# Altium footprint library WE-RJ45 LAN.PcbLib: 106 footprints (part 6 of 7)
Each footprint in its own frame and in the unit in brackets; x right, y up, seen from the top. Pads: shape width x height; smd on the part's side, far side on the other; paste and mask are expansions set on the pad; w line width, h text height; cw(c..) or ccw(c..) is an arc to the next point about the centre after c.
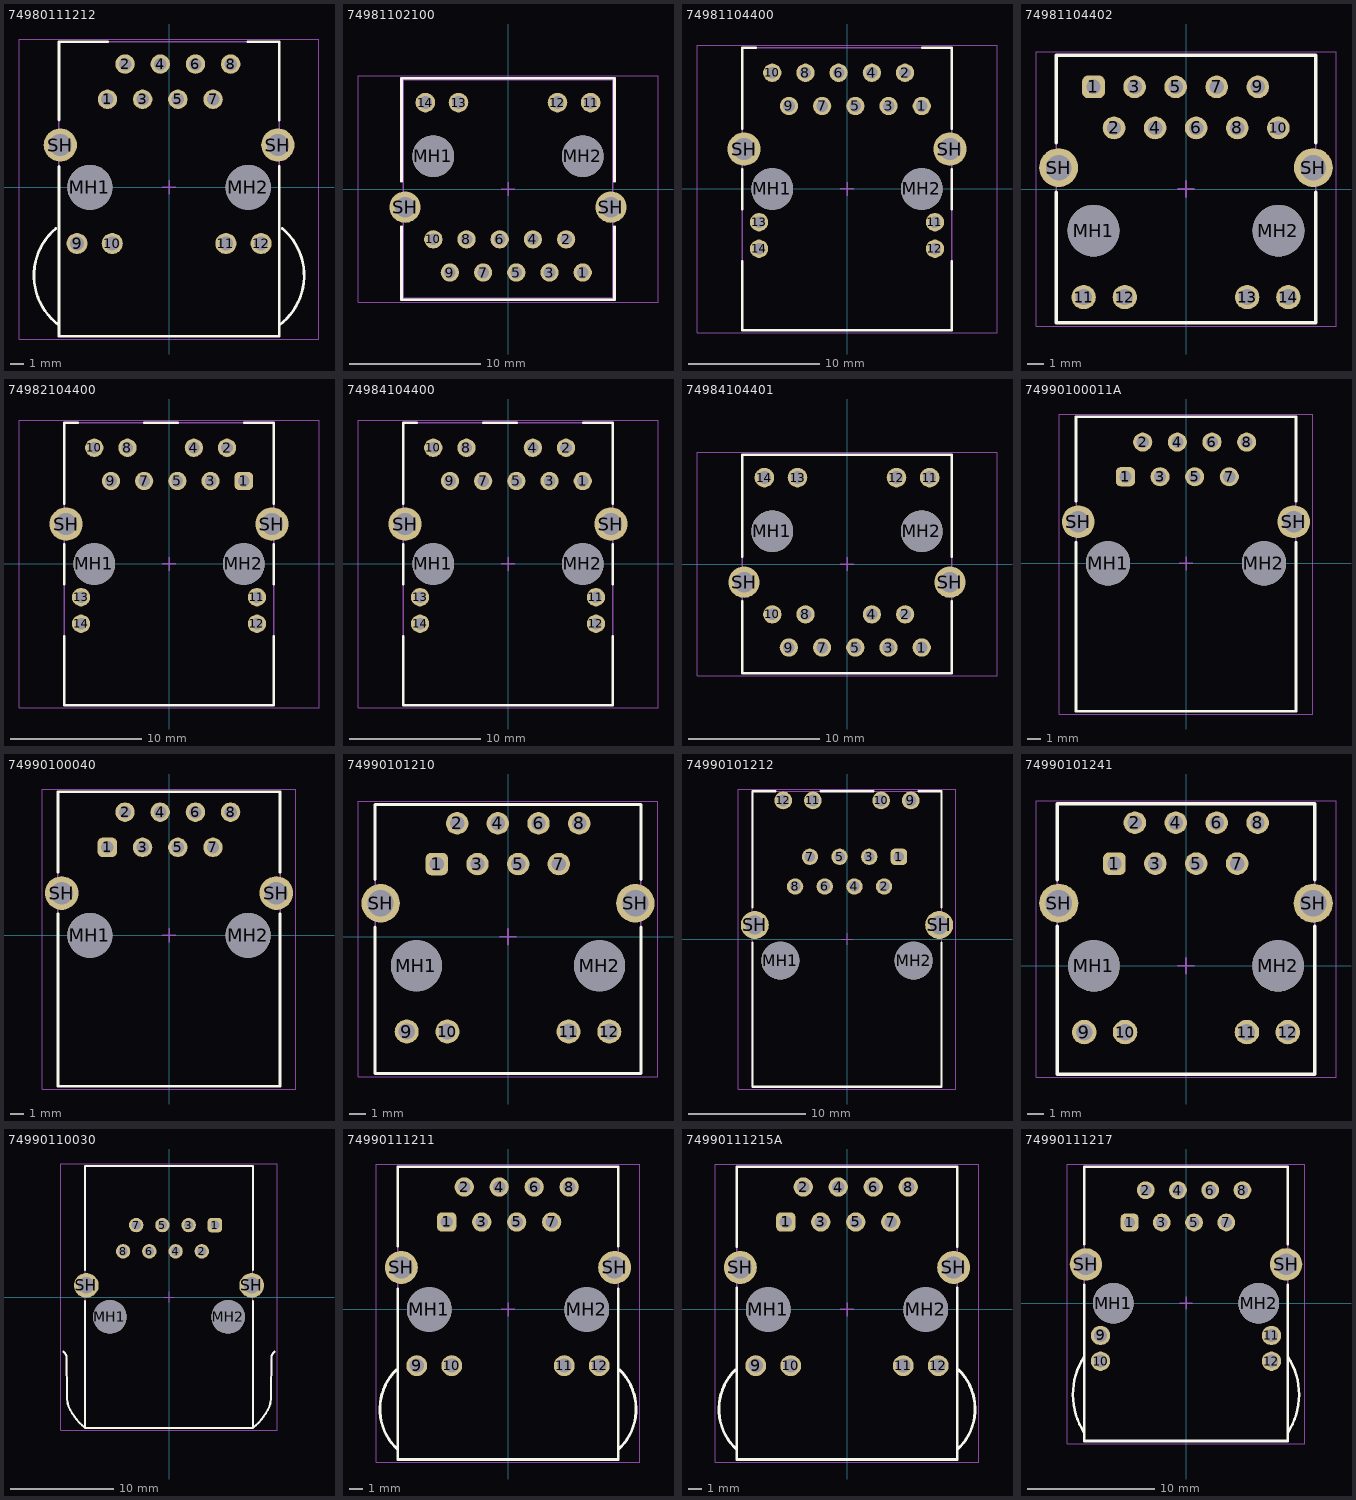
[diagram p5: the footprints below, top view; thin cyan lines are the x and y axes]

## 74980111212 [mm] "Integrated RJ45 Transformer, THR, body 15.9x21.25mm"
height 13.5
pads (16):
  round 1.4 hole 0.9: 1(-4.445,6.35) 2(-3.175,8.89) 3(-1.905,6.35) 4(-0.635,8.89) 5(0.635,6.35) 6(1.905,8.89) 7(3.175,6.35) 8(4.445,8.89)
  round 1.52 hole 1.02: 9(-6.64,-4.06) 10(-4.1,-4.06) 11(4.1,-4.06) 12(6.64,-4.06)
  round 3.25 hole 3.25 unplated: MH1(-5.715,0) MH2(5.715,0)
  round 2.4 hole 1.6: SH(-7.85,3.05) SH(7.85,3.05)
Top Overlay:
  lines w0.2: -8.171,-2.975 ccw(c-5.3,-6.375) -7.95,-9.95 ; -7.95,1.5 -7.95,-10.75 7.95,-10.75 7.95,1.5 ; -7.95,4.85 -7.95,10.5 -4.45,10.5 ; 5.7,10.5 7.95,10.5 7.95,4.85 ; 7.95,-9.95 ccw(c5.3,-6.375) 8.171,-2.975
Top Paste:
  region: 5.095,-2.46 3.095,-2.46 3.095,-5.66 5.095,-5.66
  region: 7.635,-2.46 5.635,-2.46 5.635,-5.66 7.635,-5.66
  rectangle: 3.445,7.89 5.445,10.49
  rectangle: 0.905,7.89 2.905,10.49
  rectangle: -1.635,7.89 0.365,10.49
  rectangle: -4.175,7.89 -2.175,10.49
  rectangle: 2.175,4.95 4.175,7.55
  rectangle: -0.365,4.95 1.635,7.55
  rectangle: -2.905,4.95 -0.905,7.55
  rectangle: -5.445,4.95 -3.445,7.55
  region: -4.895,4.6 -10.595,4.6 -10.595,1.8 -4.895,1.8
  rectangle: 4.895,1.8 10.595,4.6
  rectangle: -5.085,-5.66 -3.085,-2.46
  rectangle: -7.625,-5.66 -5.625,-2.46
Top Assembly:
  lines w0.1: -8.171,-2.975 ccw(c-5.3,-6.375) -7.95,-9.95 ; 7.95,-9.95 ccw(c5.3,-6.375) 8.171,-2.975 ; -7.95,-10.75 7.95,-10.75 7.95,10.5 -7.95,10.5 -7.95,-10.75
Top Designator:
  text ".Designator" at -3.647,-0.357 h1
Top 3D Body:
  lines w0.1: -8.171,-2.975 ccw(c-5.3,-6.375) -7.95,-9.95 ; 7.95,-9.95 ccw(c5.3,-6.375) 8.171,-2.975 ; -7.95,-10.75 7.95,-10.75 7.95,10.5 -7.95,10.5 -7.95,-10.75
Top Courtyard:
  lines w0.05: -10.803,-10.95 -10.803,10.7 10.793,10.7 10.793,-10.95 -10.803,-10.95
Top Component Center:
  lines w0.1: -0.5,0 0.5,0 ; 0,-0.5 0,0.5
3D body "74980111212.stp": height 16.29, standoff -2.33, extent -9.718,-10.75 9.718,10.6

## 74981102100 [mm] "LAN Transformer Through Hole Reflow, body 16.05x16.7mm"
height 16.9
pads (18):
  round 1.4 hole 0.89 paste-2539.97: 1(5.715,-6.39) 2(4.445,-3.85) 3(3.175,-6.39) 4(1.905,-3.85) 5(0.635,-6.39) 6(-0.635,-3.85) 7(-1.905,-6.39) 8(-3.175,-3.85) 9(-4.445,-6.39) 10(-5.715,-3.85)
  round 1.5 hole 1 paste-2539.97: 11(6.325,6.61) 12(3.785,6.61) 13(-3.785,6.61) 14(-6.325,6.61)
  round 3.2 hole 3.2 unplated paste-2539.97: MH1(-5.715,2.5) MH2(5.715,2.5)
  round 2.4 hole 1.57 paste-2539.97: SH(-7.875,-1.39) SH(7.875,-1.39)
Top Overlay:
  lines w0.2: -8.15,-2.9 -8.15,-8.475 8.15,-8.475 8.15,-2.9 ; -8.15,0.6 -8.15,8.475 8.15,8.475 8.15,0.6
Top Paste:
  region: 4.57,-5.45 8.07,-5.45 8.07,-7.05 4.57,-7.05
  region: -5.59,-5.45 -3.3,-5.45 -3.3,-8.05 -5.59,-8.05
  region: -3.05,-5.45 -0.76,-5.45 -0.76,-8.05 -3.05,-8.05
  region: -0.51,-5.45 1.78,-5.45 1.78,-8.05 -0.51,-8.05
  region: 2.03,-5.45 4.32,-5.45 4.32,-8.05 2.03,-8.05
  region: -4.57,-5.15 -6.86,-5.15 -6.86,-2.55 -4.57,-2.55
  region: -2.03,-5.15 -4.32,-5.15 -4.32,-2.55 -2.03,-2.55
  region: 0.51,-5.15 -1.78,-5.15 -1.78,-2.55 0.51,-2.55
  region: 3.05,-5.15 0.76,-5.15 0.76,-2.55 3.05,-2.55
  region: 5.59,-5.15 3.3,-5.15 3.3,-2.55 5.59,-2.55
  region: -4.475,0.35 -11.275,0.35 -11.275,-2.25 -4.475,-2.25
  region: 4.475,0.35 11.275,0.35 11.275,-2.25 4.475,-2.25
  region: -2.425,5.31 -4.625,5.31 -4.625,7.91 -2.425,7.91
  region: 5.145,5.31 2.945,5.31 2.945,7.91 5.145,7.91
  region: 7.685,5.31 5.485,5.31 5.485,7.91 7.685,7.91
  region: -4.965,5.31 -7.165,5.31 -7.165,7.91 -4.965,7.91
Top Assembly:
  lines w0.1: -8.025,-8.35 8.025,-8.35 8.025,8.35 -8.025,8.35 -8.025,-8.35
Top Designator:
  text ".Designator" at -3.647,-0.357 h1
Top 3D Body:
  lines w0.1: -8.025,-8.35 8.025,-8.35 8.025,8.35 -8.025,8.35 -8.025,-8.35
Top Courtyard:
  lines w0.05: -11.475,-8.675 11.475,-8.675 11.475,8.675 -11.475,8.675 -11.475,-8.675
Top Component Center:
  lines w0.1: -0.5,0 0.5,0 ; 0,-0.5 0,0.5
3D body "74981102100.stp": height 16.95, standoff -2.15, extent -8.225,-8.6 8.225,8.35

## 74981104400 [mm] "10/100/1000 Base-T, THT, 1x1, Tab up, w/o shield tabs, LED L-R yellow-green/yellow-green, THR"
height 13.85
pads (18):
  round 1.4 hole 0.89: 1(5.72,6.35) 2(4.44,8.89) 3(3.18,6.35) 4(1.9,8.89) 5(0.64,6.35) 6(-0.64,8.89) 7(-1.9,6.35) 8(-3.18,8.89) 9(-4.44,6.35) 10(-5.72,8.89) 11(6.725,-2.54) 12(6.725,-4.57) 13(-6.725,-2.54) 14(-6.725,-4.57)
  round 3.2 hole 3.2 unplated: MH1(-5.715,0) MH2(5.715,0)
  round 2.55 hole 1.7: SH(-7.875,3.05) SH(7.875,3.05)
Top Overlay:
  lines w0.2: -8,-5.55 -8,-10.8 8,-10.8 8,-5.55 ; -8,-1.55 -8,1.5 ; -8,4.6 -8,10.8 -7,10.8 ; 5.75,10.8 8,10.8 8,4.6 ; 8,-1.55 8,1.5
Top Paste:
  region: -4.825,-3.34 -8.625,-3.34 -8.625,-1.74 -4.825,-1.74
  region: -4.825,-5.37 -8.625,-5.37 -8.625,-3.77 -4.825,-3.77
  region: 8.625,-3.34 4.825,-3.34 4.825,-1.74 8.625,-1.74
  region: 8.625,-5.37 4.825,-5.37 4.825,-3.77 8.625,-3.77
  region: -3.33,7.45 -5.53,7.45 -5.53,4.65 -3.33,4.65
  region: -0.79,7.45 -2.99,7.45 -2.99,4.65 -0.79,4.65
  region: 1.75,7.45 -0.45,7.45 -0.45,4.65 1.75,4.65
  region: 4.29,7.45 2.09,7.45 2.09,4.65 4.29,4.65
  region: 6.83,7.45 4.63,7.45 4.63,4.65 6.83,4.65
  region: 5.55,7.79 3.35,7.79 3.35,10.59 5.55,10.59
  region: 3.01,7.79 0.81,7.79 0.81,10.59 3.01,10.59
  region: -4.61,7.79 -6.81,7.79 -6.81,10.59 -4.61,10.59
  region: -2.07,7.79 -4.27,7.79 -4.27,10.59 -2.07,10.59
  region: 0.47,7.79 -1.73,7.79 -1.73,10.59 0.47,10.59
  region: -4.475,1.75 -11.275,1.75 -11.275,4.35 -4.475,4.35
  region: 11.275,1.75 4.475,1.75 4.475,4.35 11.275,4.35
Assembly Notes:
  text "The stencil layout appplied for / PCB 1.6mm and Stencil 0.15mm" at -5.4,-12.65 h0.5
Top Assembly:
  lines w0.1: -8,-10.8 -8,10.8 8,10.8 8,-10.8 -8,-10.8
Top Designator:
  text ".Designator" at -3.647,-0.357 h1
Top 3D Body:
  lines w0.1: -8,-10.8 -8,10.8 8,10.8 8,-10.8 -8,-10.8
Top Courtyard:
  lines w0.05: -11.475,-11 11.475,-11 11.475,11 -11.475,11 -11.475,-11
Top Component Center:
  lines w0.1: -0.5,0 0.5,0 ; 0,-0.5 0,0.5
3D body "74981104400.stp": height 13.62, standoff -2.9, extent -8.15,-10.8 8.15,10.8

## 74981104402 [mm] "Integrated RJ45 Transformer"
height 16.9
pads (18):
  rrect50% 1.4x1.4 hole 0.89: 1(-5.72,6.315)
  round 1.4 hole 0.89: 2(-4.45,3.775) 3(-3.18,6.315) 4(-1.91,3.775) 5(-0.64,6.315) 6(0.63,3.775) 7(1.9,6.315) 8(3.17,3.775) 9(4.44,6.315) 10(5.71,3.775)
  round 1.5 hole 1: 11(-6.325,-6.685) 12(-3.785,-6.685) 13(3.785,-6.685) 14(6.325,-6.685)
  round 3.2 hole 3.2 unplated: MH1(-5.715,-2.575) MH2(5.715,-2.575)
  round 2.4 hole 1.57: SH(-7.875,1.325) SH(7.875,1.325)
Top Overlay:
  lines w0.2: -8.025,-0.2 -8.025,-8.275 8.025,-8.275 8.025,-0.2 ; -8.025,2.85 -8.025,8.275 8.025,8.275 8.025,2.85
Top Assembly:
  lines w0.1: -8.025,-8.275 8.025,-8.275 8.025,8.275 -8.025,8.275 -8.025,-8.275
Top Designator:
  text ".Designator" at -3.647,-0.357 h1
Top 3D Body:
  lines w0.1: -8.025,-8.275 8.025,-8.275 8.025,8.275 -8.025,8.275 -8.025,-8.275
Top Courtyard:
  lines w0.05: -9.275,-8.475 9.275,-8.475 9.275,8.475 -9.275,8.475 -9.275,-8.475
Top Component Center:
  lines w0.1: -0.5,0 0.5,0 ; 0,-0.5 0,0.5
3D body "74981104402.stp": height 16.95, standoff -2.15, extent -8.225,-8.425 8.225,8.275

## 74982104400 [mm] "10/100Base-T, PoE, THT, 1x1, Tab up, w/o shield tabs, LED L-R yellow-green/yellow-green, THR"
height 13.85
pads (17):
  rrect50% 1.4x1.4 hole 0.89: 1(5.72,6.35)
  round 1.4 hole 0.89: 2(4.44,8.89) 3(3.18,6.35) 4(1.9,8.89) 5(0.64,6.35) 7(-1.9,6.35) 8(-3.18,8.89) 9(-4.44,6.35) 10(-5.72,8.89) 11(6.725,-2.54) 12(6.725,-4.57) 13(-6.725,-2.54) 14(-6.725,-4.57)
  round 3.2 hole 3.2 unplated: MH1(-5.715,0) MH2(5.715,0)
  round 2.55 hole 1.7: SH(-7.875,3.05) SH(7.875,3.05)
Top Overlay:
  lines w0.2: -8,-5.55 -8,-10.8 8,-10.8 8,-5.55 ; -8,-1.56 -8,1.5 ; -8,4.6 -8,10.8 -7,10.8 ; -1.9,10.8 0.65,10.8 ; 5.75,10.8 8,10.8 8,4.6 ; 8,-1.56 8,1.5
Top Paste:
  region: 11.275,1.75 4.475,1.75 4.475,4.35 11.275,4.35
  region: -4.475,1.75 -11.275,1.75 -11.275,4.35 -4.475,4.35
  region: -2.07,7.79 -4.27,7.79 -4.27,10.59 -2.07,10.59
  region: -4.61,7.79 -6.81,7.79 -6.81,10.59 -4.61,10.59
  region: 3.01,7.79 0.81,7.79 0.81,10.59 3.01,10.59
  region: 5.55,7.79 3.35,7.79 3.35,10.59 5.55,10.59
  region: 6.83,7.45 4.63,7.45 4.63,4.65 6.83,4.65
  region: 4.29,7.45 2.09,7.45 2.09,4.65 4.29,4.65
  region: 1.75,7.45 -0.45,7.45 -0.45,4.65 1.75,4.65
  region: -0.79,7.45 -2.99,7.45 -2.99,4.65 -0.79,4.65
  region: -3.33,7.45 -5.53,7.45 -5.53,4.65 -3.33,4.65
  region: 8.625,-5.37 4.825,-5.37 4.825,-3.77 8.625,-3.77
  region: 8.625,-3.34 4.825,-3.34 4.825,-1.74 8.625,-1.74
  region: -4.825,-5.37 -8.625,-5.37 -8.625,-3.77 -4.825,-3.77
  region: -4.825,-3.34 -8.625,-3.34 -8.625,-1.74 -4.825,-1.74
Assembly Notes:
  text "The stencil layout appplied for / PCB 1.6mm and Stencil 0.15mm" at -5.125,-12.75 h0.5
Top Assembly:
  lines w0.1: -8,-10.8 8,-10.8 8,10.8 -8,10.8 -8,-10.8
Top Designator:
  text ".Designator" at -3.647,-0.357 h1
Top 3D Body:
  lines w0.1: -8,-10.8 8,-10.8 8,10.8 -8,10.8 -8,-10.8
Top Courtyard:
  lines w0.05: -11.475,-11 -11.475,11 11.475,11 11.475,-11 -11.475,-11
Top Component Center:
  lines w0.1: -0.5,0 0.5,0 ; 0,-0.5 0,0.5
3D body "74982104400.stp": height 13.62, standoff -2.9, extent -8.15,-10.8 8.15,10.8

## 74984104400 [mm] "10/100Base-T, PoE+, THT, 1x1, Tab up, w/o shield tabs, LED L-R yellow-green/yellow-green, THRw-green/yellow-green, THR"
height 13.85
pads (17):
  round 1.4 hole 0.89: 1(5.72,6.35) 2(4.44,8.89) 3(3.18,6.35) 4(1.9,8.89) 5(0.64,6.35) 7(-1.9,6.35) 8(-3.18,8.89) 9(-4.44,6.35) 10(-5.72,8.89) 11(6.725,-2.54) 12(6.725,-4.57) 13(-6.725,-2.54) 14(-6.725,-4.57)
  round 3.2 hole 3.2 unplated: MH1(-5.715,0) MH2(5.715,0)
  round 2.55 hole 1.7: SH(-7.875,3.05) SH(7.875,3.05)
Top Overlay:
  lines w0.2: -8,-5.55 -8,-10.8 8,-10.8 8,-5.55 ; -8,-1.56 -8,1.5 ; -8,4.6 -8,10.8 -7,10.8 ; -1.9,10.8 0.65,10.8 ; 5.75,10.8 8,10.8 8,4.6 ; 8,-1.56 8,1.5
Top Paste:
  region: 11.275,1.75 4.475,1.75 4.475,4.35 11.275,4.35
  region: -4.475,1.75 -11.275,1.75 -11.275,4.35 -4.475,4.35
  region: -2.07,7.79 -4.27,7.79 -4.27,10.59 -2.07,10.59
  region: -4.61,7.79 -6.81,7.79 -6.81,10.59 -4.61,10.59
  region: 3.01,7.79 0.81,7.79 0.81,10.59 3.01,10.59
  region: 5.55,7.79 3.35,7.79 3.35,10.59 5.55,10.59
  region: 6.83,7.45 4.63,7.45 4.63,4.65 6.83,4.65
  region: 4.29,7.45 2.09,7.45 2.09,4.65 4.29,4.65
  region: 1.75,7.45 -0.45,7.45 -0.45,4.65 1.75,4.65
  region: -0.79,7.45 -2.99,7.45 -2.99,4.65 -0.79,4.65
  region: -3.33,7.45 -5.53,7.45 -5.53,4.65 -3.33,4.65
  region: 8.625,-5.37 4.825,-5.37 4.825,-3.77 8.625,-3.77
  region: 8.625,-3.34 4.825,-3.34 4.825,-1.74 8.625,-1.74
  region: -4.825,-5.37 -8.625,-5.37 -8.625,-3.77 -4.825,-3.77
  region: -4.825,-3.34 -8.625,-3.34 -8.625,-1.74 -4.825,-1.74
Assembly Notes:
  text "The stencil layout appplied for / PCB 1.6mm and Stencil 0.15mm" at -5.15,-12.7 h0.5
Top Assembly:
  lines w0.1: -8,-10.8 8,-10.8 8,10.8 -8,10.8 -8,-10.8
Top Designator:
  text ".Designator" at -3.647,-0.357 h1
Top 3D Body:
  lines w0.1: -8,-10.8 8,-10.8 8,10.8 -8,10.8 -8,-10.8
Top Courtyard:
  lines w0.05: -11.475,-11 -11.475,11 11.475,11 11.475,-11 -11.475,-11
Top Component Center:
  lines w0.1: -0.5,0 0.5,0 ; 0,-0.5 0,0.5
3D body "74984104400.stp": height 13.62, standoff -2.9, extent -8.15,-10.8 8.15,10.8

## 74984104401 [mm] "LAN Transformer Through Hole Reflow, body 16.05x16.7mm"
height 16.9
pads (17):
  round 1.4 hole 0.89 paste-2539.97: 1(5.715,-6.39) 2(4.445,-3.85) 3(3.175,-6.39) 4(1.905,-3.85) 5(0.635,-6.39) 7(-1.905,-6.39) 8(-3.175,-3.85) 9(-4.445,-6.39) 10(-5.715,-3.85)
  round 1.5 hole 1 paste-2539.97: 11(6.325,6.61) 12(3.785,6.61) 13(-3.785,6.61) 14(-6.325,6.61)
  round 3.2 hole 3.2 unplated paste-2539.97: MH1(-5.715,2.5) MH2(5.715,2.5)
  round 2.4 hole 1.57 paste-2539.97: SH(-7.875,-1.39) SH(7.875,-1.39)
Top Overlay:
  lines w0.2: -8.025,-2.85 -8.025,-8.35 8.025,-8.35 8.025,-2.85 ; -8.025,0.55 -8.025,8.35 8.025,8.35 8.025,0.55
Top Paste:
  region: 4.57,-5.45 8.07,-5.45 8.07,-7.05 4.57,-7.05
  region: -5.59,-5.45 -3.3,-5.45 -3.3,-8.05 -5.59,-8.05
  region: -3.05,-5.45 -0.76,-5.45 -0.76,-8.05 -3.05,-8.05
  region: -0.51,-5.45 1.78,-5.45 1.78,-8.05 -0.51,-8.05
  region: 2.03,-5.45 4.32,-5.45 4.32,-8.05 2.03,-8.05
  region: -4.57,-5.15 -6.86,-5.15 -6.86,-2.55 -4.57,-2.55
  region: -2.03,-5.15 -4.32,-5.15 -4.32,-2.55 -2.03,-2.55
  region: 3.05,-5.15 0.76,-5.15 0.76,-2.55 3.05,-2.55
  region: 5.59,-5.15 3.3,-5.15 3.3,-2.55 5.59,-2.55
  region: -4.475,0.35 -11.275,0.35 -11.275,-2.25 -4.475,-2.25
  region: 4.475,0.35 11.275,0.35 11.275,-2.25 4.475,-2.25
  region: -2.425,5.31 -4.625,5.31 -4.625,7.91 -2.425,7.91
  region: 5.145,5.31 2.945,5.31 2.945,7.91 5.145,7.91
  region: 7.685,5.31 5.485,5.31 5.485,7.91 7.685,7.91
  region: -4.965,5.31 -7.165,5.31 -7.165,7.91 -4.965,7.91
Top Assembly:
  lines w0.1: -8.025,-8.35 8.025,-8.35 8.025,8.35 -8.025,8.35 -8.025,-8.35
Top Designator:
  text ".Designator" at -3.647,-0.357 h1
Top 3D Body:
  lines w0.1: -8.025,-8.35 8.025,-8.35 8.025,8.35 -8.025,8.35 -8.025,-8.35
Top Courtyard:
  lines w0.05: -11.475,-8.55 11.475,-8.55 11.475,8.55 -11.475,8.55 -11.475,-8.55
Top Component Center:
  lines w0.1: -0.5,0 0.5,0 ; 0,-0.5 0,0.5
3D body "74984104401.stp": height 16.95, standoff -2.15, extent -8.225,-8.35 8.223,8.35

## 74990100011A [mm] "LAN Transformer, body 21.84x16.13mm"
height 13.74
pads (12):
  rrect50% 1.4x1.4 hole 0.89: 1(-4.445,6.35)
  round 1.4 hole 0.89: 2(-3.175,8.89) 3(-1.905,6.35) 4(-0.635,8.89) 5(0.635,6.35) 6(1.905,8.89) 7(3.175,6.35) 8(4.445,8.89)
  round 3.25 hole 3.25 unplated: MH1(-5.715,0) MH2(5.715,0)
  round 2.4 hole 1.6: SH(-7.9,3.05) SH(7.9,3.05)
Top Overlay:
  lines w0.2: -8.065,1.55 -8.065,-10.85 8.065,-10.85 8.065,1.55 ; -8.065,4.55 -8.065,10.75 8.065,10.75 8.065,4.55
Top Assembly:
  lines w0.1: -8.065,-10.85 -8.065,10.75 8.065,10.75 8.065,-10.85 -8.065,-10.85
Top Designator:
  text ".Designator" at -3.647,-0.357 h1
Top 3D Body:
  lines w0.1: -8.065,-10.85 -8.065,10.75 8.065,10.75 8.065,-10.85 -8.065,-10.85
Top Courtyard:
  lines w0.05: -9.3,-11.05 9.3,-11.05 9.3,10.95 -9.3,10.95 -9.3,-11.05
Top Component Center:
  lines w0.1: -0.5,0 0.5,0 ; 0,-0.5 0,0.5
3D body "74990100011A.stp": height 13.78, standoff -2.94, extent -8.089,-10.85 8.089,10.75

## 74990100040 [mm] "10/100Base-T, THT, 1x1, Tab down, w/o shield tabs, w/o LED, ETR"
height 13.5
pads (12):
  rrect50% 1.4x1.4 hole 0.89: 1(-4.445,6.35)
  round 1.4 hole 0.89: 2(-3.175,8.89) 3(-1.905,6.35) 4(-0.635,8.89) 5(0.635,6.35) 6(1.905,8.89) 7(3.175,6.35) 8(4.445,8.89)
  round 3.25 hole 3.25 unplated: MH1(-5.715,0) MH2(5.715,0)
  round 2.43 hole 1.63: SH(-7.745,3.05) SH(7.745,3.05)
Top Overlay:
  lines w0.2: -8.02,1.55 -8.02,-10.89 8.02,-10.89 8.02,1.55 ; -8.02,4.55 -8.02,10.36 8.02,10.36 8.02,4.55
Top Assembly:
  lines w0.1: -8.02,-10.89 8.02,-10.89 8.02,10.36 -8.02,10.36 -8.02,-10.89
Top Designator:
  text ".Designator" at -3.647,-0.357 h1
Top 3D Body:
  lines w0.1: -8.02,-10.89 8.02,-10.89 8.02,10.36 -8.02,10.36 -8.02,-10.89
Top Courtyard:
  lines w0.05: -9.145,-11.09 9.145,-11.09 9.145,10.56 -9.145,10.56 -9.145,-11.09
Top Component Center:
  lines w0.1: -0.5,0 0.5,0 ; 0,-0.5 0,0.5
3D body "74990100040.stp": height 13.55, standoff -3.55, extent -8.15,-10.89 8.15,10.36

## 74990101210 [mm] "LAN Transformer, THT, body 17.1x16.6mm"
height 17.5
pads (16):
  rrect50% 1.4x1.4 hole 0.89: 1(-4.445,4.53)
  round 1.4 hole 0.89: 2(-3.175,7.07) 3(-1.905,4.53) 4(-0.635,7.07) 5(0.635,4.53) 6(1.905,7.07) 7(3.175,4.53) 8(4.445,7.07)
  round 1.5 hole 1.02: 9(-6.325,-5.93) 10(-3.785,-5.93) 11(3.785,-5.93) 12(6.325,-5.93)
  round 3.2 hole 3.2 unplated: MH1(-5.715,-1.82) MH2(5.715,-1.82)
  round 2.4 hole 1.63: SH(-7.95,2.08) SH(7.95,2.08)
Top Overlay:
  lines w0.2: -8.3,0.6 -8.3,-8.55 8.3,-8.55 8.3,0.6 ; -8.3,3.56 -8.3,8.25 8.3,8.25 8.3,3.56
Top Assembly:
  lines w0.1: -8.3,-8.55 -8.3,8.25 8.3,8.25 8.3,-8.55 -8.3,-8.55
Top Designator:
  text ".Designator" at -3.647,-0.357 h1
Top 3D Body:
  lines w0.1: -8.3,-8.55 -8.3,8.25 8.3,8.25 8.3,-8.55 -8.3,-8.55
Top Courtyard:
  lines w0.05: -9.365,-8.75 -9.365,8.45 9.365,8.45 9.365,-8.75 -9.365,-8.75
Top Component Center:
  lines w0.1: -0.5,0 0.5,0 ; 0,-0.5 0,0.5
3D body "74990101210.stp": height 17.1, standoff -3.5, extent -8.3,-8.55 8.3,8.35

## 74990101212 [mm] "LAN Transformer, body 25.3x16.2mm"
height 13.5
pads (16):
  rrect50% 1.4x1.4 hole 0.9: 1(4.445,7.04)
  round 1.4 hole 0.9: 2(3.175,4.5) 3(1.905,7.04) 4(0.635,4.5) 5(-0.635,7.04) 6(-1.905,4.5) 7(-3.175,7.04) 8(-4.445,4.5)
  round 1.52 hole 1.02: 9(5.465,11.87) 10(2.925,11.87) 11(-2.925,11.87) 12(-5.465,11.87)
  round 3.25 hole 3.25 unplated: MH1(-5.715,-1.85) MH2(5.715,-1.85)
  round 2.4 hole 1.6: SH(-7.9,1.2) SH(7.9,1.2)
Top Overlay:
  lines w0.2: -8.1,-0.3 -8.1,-12.65 8.1,-12.65 8.1,-0.3 ; -8.1,2.7 -8.1,12.65 -6.15,12.65 ; -2.25,12.65 2.24,12.65 ; 6.15,12.65 8.1,12.65 8.1,2.7
Top Assembly:
  lines w0.1: -8.1,-12.65 8.1,-12.65 8.1,12.65 -8.1,12.65 -8.1,-12.65
Top Designator:
  text ".Designator" at -3.647,-0.357 h1
Top 3D Body:
  lines w0.1: -8.1,-12.65 8.1,-12.65 8.1,12.65 -8.1,12.65 -8.1,-12.65
Top Courtyard:
  lines w0.05: -9.3,-12.85 9.3,-12.85 9.3,12.85 -9.3,12.85 -9.3,-12.85
Top Component Center:
  lines w0.1: -0.5,0 0.5,0 ; 0,-0.5 0,0.5
3D body "74990101212.stp": height 13.61, standoff -3.79, extent -8.2,-12.65 8.2,12.65

## 74990101241 [mm] "LAN Transformer, body 17.5x16.8mm"
height 17.5
pads (16):
  rrect50% 1.4x1.4 hole 0.89: 1(-4.445,6.35)
  round 1.4 hole 0.89: 2(-3.175,8.89) 3(-1.905,6.35) 4(-0.635,8.89) 5(0.635,6.35) 6(1.905,8.89) 7(3.175,6.35) 8(4.445,8.89)
  round 1.52 hole 1.02: 9(-6.325,-4.11) 10(-3.785,-4.11) 11(3.785,-4.11) 12(6.325,-4.11)
  round 3.2 hole 3.2 unplated: MH1(-5.715,0) MH2(5.715,0)
  round 2.43 hole 1.63: SH(-7.9,3.89) SH(7.9,3.89)
Top Overlay:
  lines w0.2: -8,2.47 -8,-6.73 8,-6.73 8,2.47 ; -8,5.33 -8,10.07 8,10.07 8,5.33
Top Assembly:
  lines w0.1: -8,-6.73 8,-6.73 8,10.07 -8,10.07 -8,-6.73
Top Designator:
  text ".Designator" at -3.647,-0.357 h1
Top 3D Body:
  lines w0.1: -8,-6.73 8,-6.73 8,10.07 -8,10.07 -8,-6.73
Top Courtyard:
  lines w0.05: -9.315,-6.93 -9.315,10.27 9.315,10.27 9.315,-6.93 -9.315,-6.93
Top Component Center:
  lines w0.1: -0.5,0 0.5,0 ; 0,-0.5 0,0.5
3D body "74990101241.stp": height 16.94, standoff -3.46, extent -8.17,-6.78 8.17,10.07

## 74990110030 [mm] "LAN Transformer, body 25.35x16.25mm"
height 13.5
pads (12):
  rrect50% 1.4x1.4 hole 0.9: 1(4.445,6.965)
  round 1.4 hole 0.9: 2(3.175,4.425) 3(1.905,6.965) 4(0.635,4.425) 5(-0.635,6.965) 6(-1.905,4.425) 7(-3.175,6.965) 8(-4.445,4.425)
  round 3.25 hole 3.25 unplated: MH1(-5.715,-1.925) MH2(5.715,-1.925)
  round 2.4 hole 1.6: SH(-8,1.125) SH(8,1.125)
Top Overlay:
  lines w0.2: -10.21,-5.293 cw(c-10.631,-5.879) -9.917,-5.98 -9.879,-9.38 ccw(c-3,-9.28) -9.853,-9.88 ccw(c-7.8,-9.88) -9.728,-10.585 ccw(c-4.3,-8.08) -8.125,-12.675 ; -8.125,-0.375 -8.125,-12.675 ; -8.125,2.625 -8.125,12.675 8.125,12.675 8.125,2.625 ; 8.125,-0.375 8.125,-12.675 ; 10.21,-5.293 ccw(c10.631,-5.879) 9.917,-5.98 9.879,-9.38 cw(c3,-9.28) 9.853,-9.88 cw(c7.8,-9.88) 9.728,-10.585 cw(c4.3,-8.08) 8.125,-12.675 ; -8.125,-12.675 8.125,-12.675
Top Assembly:
  lines w0.1: -10.21,-5.293 cw(c-10.631,-5.879) -9.917,-5.98 -9.879,-9.38 ccw(c-3,-9.28) -9.853,-9.88 ccw(c-7.8,-9.88) -9.728,-10.585 ccw(c-4.3,-8.08) -8.125,-12.675 ; 10.21,-5.293 ccw(c10.631,-5.879) 9.917,-5.98 9.879,-9.38 cw(c3,-9.28) 9.853,-9.88 cw(c7.8,-9.88) 9.728,-10.585 cw(c4.3,-8.08) 8.125,-12.675 ; -8.125,-12.675 -8.125,12.675 8.125,12.675 8.125,-12.675 ; -8.125,-12.675 8.125,-12.675
Top Designator:
  text ".Designator" at -3.647,-0.357 h1
Top 3D Body:
  lines w0.1: -10.21,-5.293 cw(c-10.631,-5.879) -9.917,-5.98 -9.879,-9.38 ccw(c-3,-9.28) -9.853,-9.88 ccw(c-7.8,-9.88) -9.728,-10.585 ccw(c-4.3,-8.08) -8.125,-12.675 ; 10.21,-5.293 ccw(c10.631,-5.879) 9.917,-5.98 9.879,-9.38 cw(c3,-9.28) 9.853,-9.88 cw(c7.8,-9.88) 9.728,-10.585 cw(c4.3,-8.08) 8.125,-12.675 ; -8.125,-12.675 -8.125,12.675 8.125,12.675 8.125,-12.675 ; -8.125,-12.675 8.125,-12.675
Top Courtyard:
  lines w0.05: -10.5,-12.875 10.5,-12.875 10.5,12.875 -10.5,12.875 -10.5,-12.875
Top Component Center:
  lines w0.1: -0.5,0 0.5,0 ; 0,-0.5 0,0.5
3D body "74990110030.stp": height 15.78, standoff -3.33, extent -10.298,-12.675 10.298,12.675

## 74990111211 [mm] "Integrated RJ45 Transformer, THT, body 16.00 x 21.25 mm"
height 13.5
pads (16):
  rrect50% 1.4x1.4 hole 0.9: 1(-4.45,6.35)
  round 1.4 hole 0.9: 2(-3.18,8.89) 3(-1.91,6.35) 4(-0.64,8.89) 5(0.63,6.35) 6(1.9,8.89) 7(3.17,6.35) 8(4.44,8.89)
  round 1.52 hole 1.03: 9(-6.625,-4.08) 10(-4.085,-4.08) 11(4.085,-4.08) 12(6.625,-4.08)
  round 3.25 hole 3.25 unplated: MH1(-5.715,0) MH2(5.715,0)
  round 2.4 hole 1.6: SH(-7.745,3.05) SH(7.745,3.05)
Top Overlay:
  lines w0.2: -8.099,-4.377 ccw(c-5.31,-7.23) -8.001,-10.176 ; -8,1.5 -8,-10.89 8,-10.89 8,1.5 ; -8,4.6 -8,10.36 8,10.36 8,4.6 ; 8.001,-10.176 ccw(c5.31,-7.23) 8.099,-4.377
Top Assembly:
  lines w0.1: -8.099,-4.377 ccw(c-5.31,-7.23) -8.001,-10.176 ; 8.001,-10.176 ccw(c5.31,-7.23) 8.099,-4.377 ; -8,-10.89 -8,10.36 8,10.36 8,-10.89 -8,-10.89
Top Designator:
  text ".Designator" at -3.647,-0.357 h1
Top 3D Body:
  lines w0.1: -8.099,-4.377 ccw(c-5.31,-7.23) -8.001,-10.176 ; 8.001,-10.176 ccw(c5.31,-7.23) 8.099,-4.377 ; -8,-10.89 -8,10.36 8,10.36 8,-10.89 -8,-10.89
Top Courtyard:
  lines w0.05: -9.548,-11.09 9.548,-11.09 9.548,10.56 -9.548,10.56 -9.548,-11.09
Top Component Center:
  lines w0.1: -0.5,0 0.5,0 ; 0,-0.5 0,0.5
3D body "74990111211.stp": height 14.95, standoff -3.5, extent -9.348,-10.89 9.348,10.36

## 74990111215A [mm] "RJ45 LAN Transformer, THT, body 16.00 x 21.25 mm"
height 13.5
pads (16):
  rrect50% 1.4x1.4 hole 0.9: 1(-4.445,6.35)
  round 1.4 hole 0.9: 2(-3.175,8.89) 3(-1.905,6.35) 4(-0.635,8.89) 5(0.635,6.35) 6(1.905,8.89) 7(3.175,6.35) 8(4.445,8.89)
  round 1.52 hole 1.02: 9(-6.625,-4.08) 10(-4.085,-4.08) 11(4.085,-4.08) 12(6.625,-4.08)
  round 3.25 hole 3.25 unplated: MH1(-5.715,0) MH2(5.715,0)
  round 2.4 hole 1.6: SH(-7.745,3.05) SH(7.745,3.05)
Top Overlay:
  lines w0.2: -8.099,-4.377 ccw(c-5.31,-7.23) -8.001,-10.176 ; -8,1.55 -8,-10.89 8,-10.89 8,1.55 ; -8,4.55 -8,10.36 8,10.36 8,4.55 ; 8.001,-10.176 ccw(c5.31,-7.23) 8.099,-4.377
Top Assembly:
  lines w0.1: -8.099,-4.377 ccw(c-5.31,-7.23) -8.001,-10.176 ; 8.001,-10.176 ccw(c5.31,-7.23) 8.099,-4.377 ; -8,-10.89 8,-10.89 8,10.36 -8,10.36 -8,-10.89
Top Designator:
  text ".Designator" at -3.647,-0.357 h1
Top 3D Body:
  lines w0.1: -8.099,-4.377 ccw(c-5.31,-7.23) -8.001,-10.176 ; 8.001,-10.176 ccw(c5.31,-7.23) 8.099,-4.377 ; -8,-10.89 8,-10.89 8,10.36 -8,10.36 -8,-10.89
Top Courtyard:
  lines w0.05: -9.548,-11.09 9.548,-11.09 9.548,10.56 -9.548,10.56 -9.548,-11.09
Top Component Center:
  lines w0.1: -0.5,0 0.5,0 ; 0,-0.5 0,0.5
3D body "74990111215A.stp": height 14.95, standoff -3.5, extent -9.348,-10.89 9.348,10.36

## 74990111217 [mm] "LAN Transformer, body 21.3x16mm"
height 15.01
pads (16):
  rrect50% 1.4x1.4 hole 0.89: 1(-4.445,6.35)
  round 1.4 hole 0.89: 2(-3.175,8.89) 3(-1.905,6.35) 4(-0.635,8.89) 5(0.635,6.35) 6(1.905,8.89) 7(3.175,6.35) 8(4.445,8.89)
  round 1.52 hole 1.02: 9(-6.725,-2.54) 10(-6.725,-4.57) 11(6.725,-2.54) 12(6.725,-4.57)
  round 3.2 hole 3.2 unplated: MH1(-5.715,0) MH2(5.715,0)
  round 2.55 hole 1.7: SH(-7.875,3.05) SH(7.875,3.05)
Top Overlay:
  lines w0.2: -8.025,-4.229 ccw(c-3.435,-7.196) -8,-10.2 ; -8,1.45 -8,-10.85 8,-10.85 8,1.45 ; -8,4.65 -8,10.75 8,10.75 8,4.65 ; 8,-10.2 ccw(c3.435,-7.196) 8.025,-4.229
Top Assembly:
  lines w0.1: -8.025,-4.229 ccw(c-3.435,-7.196) -8,-10.2 ; 8,-10.2 ccw(c3.435,-7.196) 8.025,-4.229 ; -8,-10.85 8,-10.85 8,10.75 -8,10.75 -8,-10.85
Top Designator:
  text ".Designator" at -3.647,-0.357 h1
Top 3D Body:
  lines w0.1: -8.025,-4.229 ccw(c-3.435,-7.196) -8,-10.2 ; 8,-10.2 ccw(c3.435,-7.196) 8.025,-4.229 ; -8,-10.85 8,-10.85 8,10.75 -8,10.75 -8,-10.85
Top Courtyard:
  lines w0.05: -9.35,-11.05 9.35,-11.05 9.35,10.95 -9.35,10.95 -9.35,-11.05
Top Component Center:
  lines w0.1: -0.5,0 0.5,0 ; 0,-0.5 0,0.5
3D body "74990111217.stp": height 14.81, standoff -3.09, extent -8.95,-10.85 8.95,10.75